# EAGLE library part 74LVC1G175 (library ce_fdd_v40)
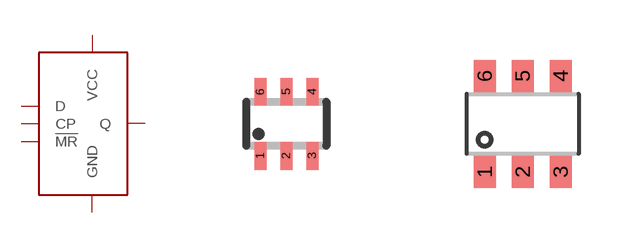
[diagram p1: symbol with the pads of SOT363; footprints SOT363, SOT457]

Designator prefix -

## 74LVC1G175SOT363_SC88  [SOT363]
1  CP
2  GND
3  D
4  Q
5  VCC
6  !MR

## 74LVC1G175SOT457_SC74  [SOT457]
Pads as for SOT363

## Footprint SOT363 (pad centres in mm)
smd 0.3 x 0.7: 1 -0.65,-0.8; 2 0,-0.8; 3 0.65,-0.8; 4 0.65,0.8; 5 0,0.8; 6 -0.65,0.8

## Footprint SOT457 (pad centres in mm)
smd 0.55 x 0.8: 1 -0.95,-1.2; 2 0,-1.2; 3 0.95,-1.2; 4 0.95,1.2; 5 0,1.2; 6 -0.95,1.2